# Altium footprint library LCD_NHD-0420E2Z-FSW-GBW.PcbLib: 1 footprints
Each footprint in its own frame and in the unit in brackets; x right, y up, seen from the top. Pads: shape width x height; smd on the part's side, far side on the other; paste and mask are expansions set on the pad; w line width, h text height; cw(c..) or ccw(c..) is an arc to the next point about the centre after c.
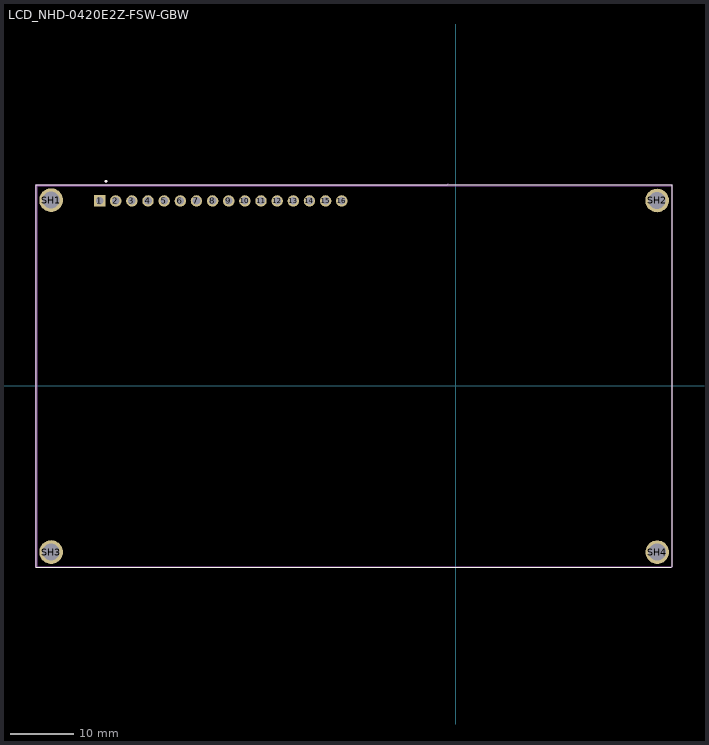
[diagram p0: the footprint, top view; thin cyan lines are the x and y axes]

## LCD_NHD-0420E2Z-FSW-GBW [mm]
height 14.5
pads (20):
  rect 1.8x1.8 / inner round 1.8 / far side rect 1.8x1.8 hole 1.2: 1(-56.007,29.083)
  round 1.8 hole 1.2: 2(-53.467,29.083) 3(-50.927,29.083) 4(-48.387,29.083) 5(-45.847,29.083) 6(-43.307,29.083) 7(-40.767,29.083) 8(-38.227,29.083) 9(-35.687,29.083) 10(-33.147,29.083) 11(-30.607,29.083) 12(-28.067,29.083) 13(-25.527,29.083) 14(-22.987,29.083) 15(-20.447,29.083) 16(-17.907,29.083)
  round 3.716 hole 2.7: SH1(-63.627,29.21) SH2(31.715,29.156) SH3(-63.627,-26.162) SH4(31.734,-26.181)
Top Overlay:
  circle w0.2: c-55,32.179 r0.1
  lines w0.127: -66.04,-28.575 33.96,-28.575 ; -66.04,-28.496 -66.04,31.623 34.087,31.623 ; 34.036,-28.504 34.036,31.496
Assembly Top:
  lines w0.127: -66.04,-28.575 33.96,-28.575 ; -66.04,-28.504 -66.04,31.623 -62.103,31.623 -55.626,31.623 -1.27,31.623 -1.143,31.75 34.036,31.623 ; 34.036,-28.448 34.036,31.425
  lines w0.2: -55.099,32.194 ccw(c-55,32.179) -54.9,32.179
Courtyard Top:
  lines w0.05: -65.913,-28.5 -65.913,31.496 34.087,31.496 ; -65.913,-28.448 34.087,-28.448 ; 34.036,-28.377 34.036,31.623
3D body: height 0.25, standoff 0, extent -66.04,-28.448 34.036,31.75